# Altium schematic symbol library DF2S6P2FS,L3M.SchLib: 1 symbol
Pins are listed as number, name and electrical type; pins without a type are passive.

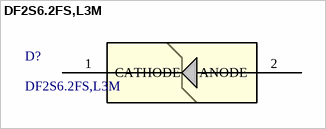
[diagram p0: symbol DF2S6.2FS,L3M]

## DF2S6.2FS,L3M
designator D?
Unidirectional TVS Diode (ESD Protection Diode), 5.0 V, SOD-923; Manufacturer_Name: Toshiba Electronic Devices & Storage Corp.; Copyright: Copyright (C) 2026 Ultra Librarian. All rights reserved.; Manufacturer_Part_Number: DF2S6.2FS,L3M; RefDes: RefDes; Type: Type
footprint SOD-923_TOS
pins: 1 CATHODE, 2 ANODE